# Altium schematic symbol library airsense_lib.SchLib: 13 symbols
Pins are listed as number, name and electrical type; pins without a type are passive.

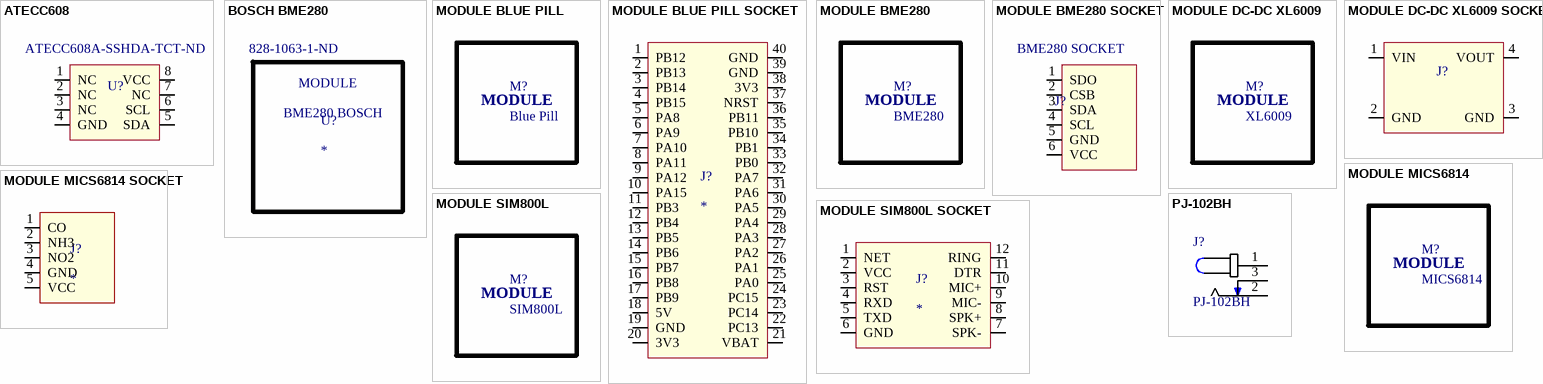
[diagram p0: symbols ATECC608 to PJ-102BH]

## ATECC608
designator U?, comment Supplier Part Number 1: ATECC608A-SSHDA-TCT-ND  (hidden comment: Authentication Chip)
Authentication Chip IC Networking and Communications 8-SOIC; Manufacturer: Microchip Technology; Manufacturer Part Number: ATECC608A-SSHDA-T; Supplier 1: Digi-Key; RoHS: RoHS Compliant; Category: Integrated Circuits (ICs); Stock 1: 172; Pricing 1: 1=0.91, 25=0.8644 (USD); Packaging: Cut Tape (CT); Part Status: Active; Type: Authentication Chip; Applications: Networking and Communications; Mounting Type: Surface Mount; Package / Case: 8-SOIC (0.154", 3.90mm Width); Supplier Device Package: 8-SOIC; ComponentLink1URL: http://www.microchip.com/mymicrochip/filehandler.aspx?ddocname=en601565; ComponentLink1Description: http://www.microchip.com/mymicrochip/filehandler.aspx?ddocname=en601565
footprint SOIC127P600X175-8AN
pins: 1 NC, 2 NC, 3 NC, 4 GND, 5 SDA, 6 SCL, 7 NC, 8 VCC

## BOSCH BME280
designator U?  Supplier Part Number 1: 828-1063-1-ND
SENSOR PRESSURE HUMIDITY TEMP; Manufacturer: Bosch Sensortec; Manufacturer Part Number: BME280; Sensor Type: Humidity, Pressure, Temperature; Humidity Range: 0 ~ 100% RH; Output Type: I²C, SPI; Output: 16b; Accuracy: ±3%; Voltage - Supply: 1.71 V ~ 3.6 V; Supplier 1: Digi-Key; RoHS: RoHS Compliant; Category: Sensors, Transducers; Stock 1: 41217; Pricing 1: 1=7.56, 5=6.628, 10=5.965, 25=5.302, 50=4.9044, 100=4.2416, 500=3.9765, 1000=3.7114 (USD); Packaging: Cut Tape (CT); Part Status: Active; Sensitivity: -; Mounting Type: Surface Mount; Operating Temperature: -40°C ~ 85°C; Package / Case: 8-VFLGA; Supplier Device Package: 8-LGA (2.5x2.5); ComponentLink1URL: https://ae-bst.resource.bosch.com/media/_tech/media/datasheets/BST-BME280-DS002.pdf; ComponentLink1Description: https://ae-bst.resource.bosch.com/media/_tech/media/datasheets/BST-BME280-DS002.pdf
text: MODULE; BME280 BOSCH

## MODULE BLUE PILL
designator M?, comment Blue Pill
text: MODULE

## MODULE BLUE PILL SOCKET
designator J?
footprint MODULE BLUE PILL SOCKET
pins: 1 PB12, 2 PB13, 3 PB14, 4 PB15, 5 PA8, 6 PA9, 7 PA10, 8 PA11, 9 PA12, 10 PA15, 11 PB3, 12 PB4, 13 PB5, 14 PB6, 15 PB7, 16 PB8, 17 PB9, 18 5V, 19 GND, 20 3V3, 21 VBAT, 22 PC13, 23 PC14, 24 PC15, 25 PA0, 26 PA1, 27 PA2, 28 PA3, 29 PA4, 30 PA5, 31 PA6, 32 PA7, 33 PB0, 34 PB1, 35 PB10, 36 PB11, 37 NRST, 38 3V3, 39 GND, 40 GND

## MODULE BME280
designator M?, comment BME280
text: MODULE

## MODULE BME280 SOCKET
designator J?, comment Socket  (value not drawn)
CONN HEADER FEMALE 6POS .1" GOLD; Manufacturer: Sullins Connector Solutions; Manufacturer Part Number: PPPC061LFBN-RC; Number of Positions: 6; Number of Positions Loaded: All; Pitch: 0.100" (2.54mm); Supplier 1: Digi-Key; RoHS: RoHS Compliant; Category: Connectors, Interconnects; Stock 1: 15924; Pricing 1: 1=0.7, 10=0.546, 25=0.5088, 50=0.4626, 100=0.4163, 250=0.35152, 500=0.333, 1000=0.296, 2500=0.24605 (USD); Packaging: Bulk; Connector Type: Header; Contact Type: Female Socket; Number of Rows: 1; Row Spacing: -; Mounting Type: Through Hole; Termination: Solder; Fastening Type: -; Features: -; Contact Finish: Gold; Contact Finish Thickness: Flash; Color: Black; ComponentLink1URL: http://www.sullinscorp.com/drawings/78_P(N)PxCxxxLFBN-RC,_10492-H.pdf; ComponentLink1Description: http://www.sullinscorp.com/drawings/78_P(N)PxCxxxLFBN-RC,_10492-H.pdf; Supplier Part Number 1: S7039-ND
footprint MODULE BME280 SOCKET
pins: 1 SDO, 2 CSB, 3 SDA, 4 SCL, 5 GND, 6 VCC
text: BME280 SOCKET

## MODULE DC-DC XL6009
designator M?, comment XL6009
text: MODULE

## MODULE DC-DC XL6009 SOCKET
designator J?, comment XL6009  (value not drawn)
footprint MODULE DC-DC XL6009 SOCKET
pins: 1 VIN, 2 GND, 3 GND, 4 VOUT

## MODULE MICS6814
designator M?, comment MICS6814
text: MODULE

## MODULE MICS6814 SOCKET
designator J?
footprint MODULE MICS6814 SOCKET (GAS SENSOR BREAKOUT BOARD)
pins: 1 CO, 2 NH3, 3 NO2, 4 GND, 5 VCC

## MODULE SIM800L
designator M?, comment SIM800L
text: MODULE

## MODULE SIM800L SOCKET
designator J?
footprint MODULE SIM800L SOCKET (GSM GRPS MODULE BREAKOUT BOARD)
pins: 1 NET, 2 VCC, 3 RST, 4 RXD, 5 TXD, 6 GND, 7 SPK-, 8 SPK+, 9 MIC-, 10 MIC+, 11 DTR, 12 RING

## PJ-102BH
designator J?
CONN PWR JACK 2.5X5.5MM SOLDER; Manufacturer: CUI Inc.; Gender: Male; Industry Recognized Mating Diameter: 2.50mm ID (0.098"), 5.50mm OD (0.217"); Actual Diameter: 0.098" (2.50mm ID), 0.256" (6.50mm OD); Number of Positions/Contacts: 2 Conductors, 3 Contacts; Internal Switch(s): Single Switch, Normally Closed; Shielding: Unshielded; Voltage - Rated: 24VDC; Mating Length/Depth: 0.354" (9.00mm); Body Color: Black; Material Flammability Rating: UL94 V-0; Value: *; Supplier 1: Digi-Key; Manufacturer Part Number: PJ-102BH; RoHS: RoHS Compliant; Category: Connectors, Interconnects; Stock 1: 7742; Pricing 1: 1=0.77, 10=0.72, 25=0.648, 50=0.576, 100=0.552, 280=0.504, 560=0.48, 1120=0.396, 2520=0.36 (USD); Packaging: Tray; Part Status: Active; Connector Type: Jack; Mounting Type: Through Hole, Right Angle; Mounting Feature: -; Termination: Solder; Features: -; Insulation Color: -; Ingress Protection: -; Contact Material - Plating: Silver; Body Material: -; Operating Temperature: -25°C ~ 85°C; Includes: -; Housing Material: Polybutylene Terephthalate (PBT); Contact Material: Brass; Copper Alloy; Thread Size: -; ComponentLink1URL: https://www.cui.com/product/resource/digikeypdf/pj-102bh.pdf; ComponentLink1Description: https://www.cui.com/product/resource/digikeypdf/pj-102bh.pdf; Supplier Part Number 1: CP-102BH-ND
footprint CUI_PJ-102BH
pins: 1, 2, 3